# Altium footprint library DIM.PcbLib: 183 footprints (part 3 of 12)
Each footprint in its own frame and in the unit in brackets; x right, y up, seen from the top. Pads: shape width x height; smd on the part's side, far side on the other; paste and mask are expansions set on the pad; w line width, h text height; cw(c..) or ccw(c..) is an arc to the next point about the centre after c.
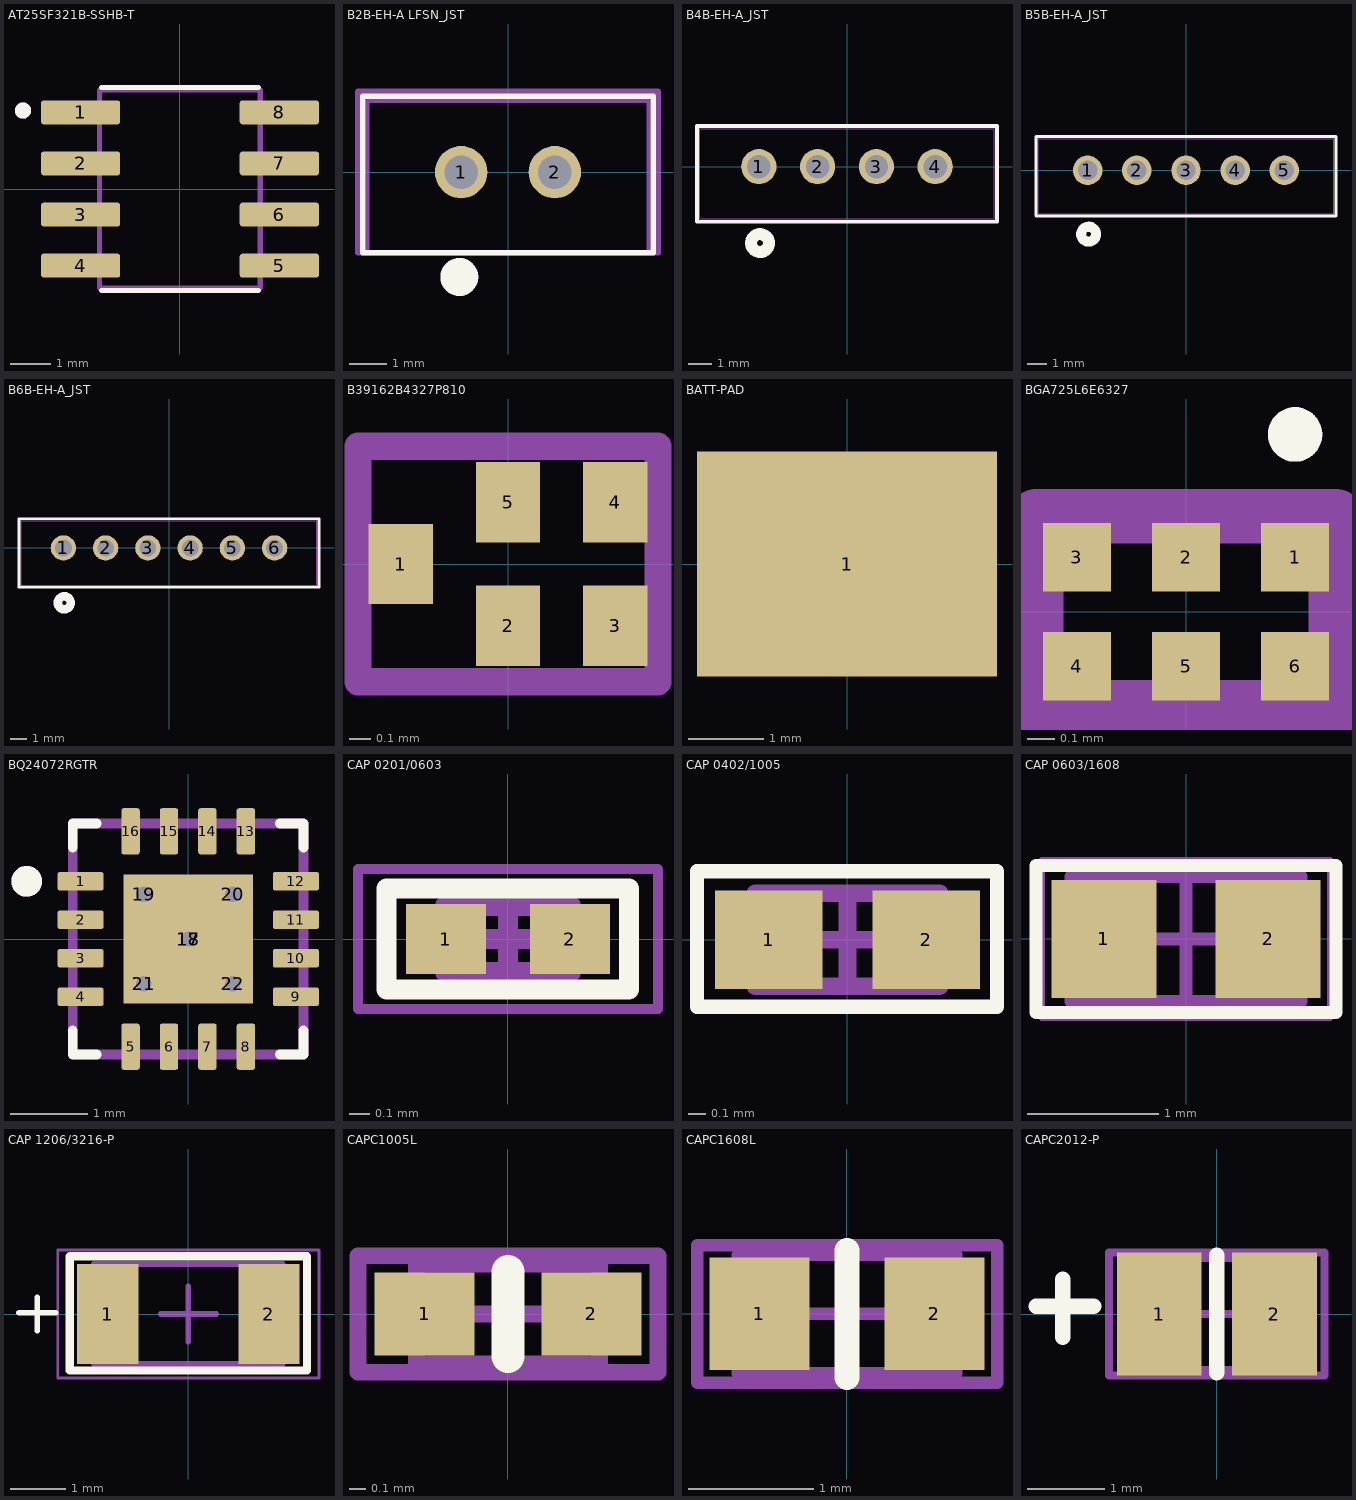
[diagram p2: the footprints below, top view; thin cyan lines are the x and y axes]

## AT25SF321B-SSHB-T [mm]
height 1.75
pads (8):
  rrect25% 1.97x0.6 smd: 1(-2.47,1.905) 2(-2.47,0.635) 3(-2.47,-0.635) 4(-2.47,-1.905) 5(2.47,-1.905) 6(2.47,-0.635) 7(2.47,0.635) 8(2.47,1.905)
Top Overlay:
  circle w0.2: c-3.9,1.95 r0.1
  lines w0.127: -1.95,-2.525 1.95,-2.525 ; -1.95,2.525 1.95,2.525
Mechanical 13:
  circle w0.2: c-3.9,1.95 r0.1
  lines w0.127: -1.995,-2.462 -1.995,2.462 1.995,2.462 1.995,-2.462 -1.995,-2.462
3D body "step_temp.STEP": height 1.75, standoff 0, extent -2.997,-2.462 2.997,2.462

## B2B-EH-A LFSN_JST [mm]
pads (2):
  round 1.397 hole 0.9 paste-2539.97 mask+0.102: 1(-1.25,0) 2(1.25,0)
Top Overlay:
  circle w0.508: c-1.3,-2.8 r0.254
  lines w0.152: -3.877,-2.15 3.877,-2.15 3.877,2.027 -3.877,2.027 -3.877,-2.15
Mechanical 13:
  lines w0.1: -3.75,-2.15 3.75,-2.15 3.75,1.9 -3.75,1.9 -3.75,-2.15
Mechanical 15:
  lines w0.152: -4.004,-2.154 -4.004,2.154 4.004,2.154 4.004,-2.154 -4.004,-2.154
3D body "B2B-EH-A.STEP": height 6, standoff -3.2, extent -3.75,-2.2 3.75,1.6

## B4B-EH-A_JST [mil]
pads (4):
  round 59 hole 39 paste-99999 mask+0: 1(-147.64,0) 2(-49.21,0) 3(49.21,0) 4(147.64,0)
Top Overlay:
  circle w20: c-145.67,-127.95 r15
  lines w6: -251.07,-92 -251.07,68 251.06,68 251.06,-92 -251.07,-92
Mechanical 13:
  lines w1: -246.07,-87 -246.07,63 246.06,63 246.06,-87 -246.07,-87

## B5B-EH-A_JST [mil]
pads (5):
  round 59 hole 39 paste-99999 mask+0: 1(-196.85,0) 2(-98.43,0) 3(0,0) 4(98.43,0) 5(196.85,0)
Top Overlay:
  circle w20: c-194.88,-127.95 r15
  lines w6: -300.29,-92 300.28,-92 300.28,68 -300.29,68 -300.29,-92
Mechanical 13:
  lines w1: -295.29,-87 295.28,-87 295.28,63 -295.29,63 -295.29,-87

## B6B-EH-A_JST [mil]
pads (6):
  round 59 hole 39 paste-99999 mask+0: 1(-246.06,0) 2(-147.64,0) 3(-49.21,0) 4(49.21,0) 5(147.64,0) 6(246.06,0)
Top Overlay:
  circle w20: c-244.09,-127.95 r15
  lines w6: -349.5,-92 -349.5,68 349.5,68 349.5,-92 -349.5,-92
Mechanical 13:
  lines w1: -344.5,-87 -344.5,63 344.5,63 344.5,-87 -344.5,-87

## B39162B4327P810 [mm]
pads (5):
  rect 0.3x0.375 smd: 1(-0.5,0) 2(0,-0.288) 3(0.5,-0.288) 4(0.5,0.288) 5(0,0.288)
Mechanical 13:
  lines w0.127: -0.7,-0.55 0.7,-0.55 0.7,0.55 -0.7,0.55 -0.7,-0.55

## BATT-PAD [mm]
pads (1):
  rect 4x3 smd mask+0.051: 1(0,0)

## BGA725L6E6327 [mm]
pads (6):
  rect 0.25x0.25 smd: 1(0.4,0.2) 2(0,0.2) 3(-0.4,0.2) 4(-0.4,-0.2) 5(0,-0.2) 6(0.4,-0.2)
Top Overlay:
  lines w0.1: 0.35,0.65 cw(c0.4,0.65) 0.45,0.65 cw(c0.4,0.65) 0.35,0.65
Mechanical 13:
  lines w0.2: -0.55,-0.35 -0.55,0.35 0.55,0.35 0.55,-0.35 -0.55,-0.35
3D body "BGA_725L6_E6327.stp": height 0.5, standoff 0, extent -0.55,-0.35 0.55,0.35

## BQ24072RGTR [mm]
pads (22):
  rrect25% 0.6x0.24 smd: 1(-1.4,0.75) 2(-1.4,0.25) 3(-1.4,-0.25) 4(-1.4,-0.75) 9(1.4,-0.75) 10(1.4,-0.25) 11(1.4,0.25) 12(1.4,0.75)
  rrect25% 0.24x0.6 smd: 5(-0.75,-1.4) 6(-0.25,-1.4) 7(0.25,-1.4) 8(0.75,-1.4) 13(0.75,1.4) 14(0.25,1.4) 15(-0.25,1.4) 16(-0.75,1.4)
  rect 1.68x1.68 smd paste-0.31: 17(0,0)
  round 0.4 hole 0.2 mask+0: 18(0,0) 19(-0.58,0.58) 20(0.58,0.58) 21(-0.58,-0.58) 22(0.58,-0.58)
Top Overlay:
  circle w0.2: c-2.1,0.75 r0.1
  lines w0.127: -1.5,-1.19 -1.5,-1.5 -1.19,-1.5 ; -1.5,1.19 -1.5,1.5 -1.19,1.5 ; 1.19,-1.5 1.5,-1.5 1.5,-1.19 ; 1.19,1.5 1.5,1.5 1.5,1.19
Mechanical 13:
  circle w0.2: c-2.1,0.75 r0.1
  lines w0.127: -1.5,-1.5 -1.5,1.5 1.5,1.5 1.5,-1.5 -1.5,-1.5
3D body "step_temp.STEP": height 1, standoff 0, extent -1.5,-1.5 1.5,1.5

## CAP 0201/0603 [mm] "Chip Capacitor, 2-Leads, Body 0.60x0.30mm, IPC Medium Density"
height 0.33
pads (2):
  rect 0.4x0.35 smd: 1(-0.31,0) 2(0.31,0)
Top Overlay:
  lines w0.1: -0.608,-0.252 -0.608,0.253 0.606,0.253 0.606,-0.252 -0.608,-0.252
Mechanical 13:
  lines w0.1: -0.315,-0.165 0.315,-0.165 0.315,0.165 -0.315,0.165 -0.315,-0.165
Mechanical 15:
  lines w0.05: -0.75,-0.35 0.75,-0.35 0.75,0.35 -0.75,0.35 -0.75,-0.35
  lines w0.1: -0.165,0 0.165,0 ; 0,-0.165 0,0.165
3D body "CAP 0201.STEP": height 0.3, standoff 0, extent -0.3,-0.15 0.3,0.15

## CAP 0402/1005 [mm] "Chip Capacitor, 2-Leads, Body 1.02x0.51mm, IPC Medium Density"
height 0.52
pads (2):
  rect 0.6x0.55 smd: 1(-0.44,0) 2(0.44,0)
Top Overlay:
  lines w0.08: -0.841,-0.374 0.836,-0.374 0.836,0.382 -0.841,0.382 -0.841,-0.141 -0.841,-0.374
Mechanical 13:
  lines w0.1: -0.515,-0.26 -0.515,0.26 0.515,0.26 0.515,-0.26 -0.515,-0.26
Mechanical 15:
  lines w0.1: -0.26,0 0.26,0 ; 0,-0.26 0,0.26
3D body "0402 cap.STEP": height 0.52, standoff 0, extent -0.5,-0.262 0.5,0.262

## CAP 0603/1608 [mm] "Chip Capacitor, 2-Leads, Body 1.60x0.80mm, IPC High Density"
height 0.89
pads (2):
  rect 0.8x0.9 smd: 1(-0.625,0) 2(0.625,0)
Top Overlay:
  lines w0.1: -1.143,-0.559 -1.143,0.559 1.143,0.559 1.143,-0.559 -1.143,-0.559
Mechanical 13:
  lines w0.1: -0.875,-0.475 -0.875,0.475 0.875,0.475 0.875,-0.475 -0.875,-0.475
Mechanical 15:
  lines w0.05: -1.1,-0.6 -1.1,0.6 1.1,0.6 1.1,-0.6 -1.1,-0.6
  lines w0.1: -0.475,0 0.475,0 ; 0,-0.475 0,0.475
3D body "0603 cap.STEP": height 0.82, standoff 0, extent -0.8,-0.412 0.8,0.412

## CAP 1206/3216-P [mm] "Chip Capacitor, 2-Leads, Body 3.25x1.60mm, IPC Medium Density"
height 0.8
pads (2):
  rect 1.1x1.8 smd: 1(-1.45,0) 2(1.45,0)
Top Overlay:
  lines w0.1: -3.048,0.025 -2.388,0.025 ; -2.718,-0.305 -2.718,0.305
  lines w0.15: -2.134,-1.016 2.134,-1.016 2.134,1.041 -2.134,1.041 -2.134,-1.016
Mechanical 13:
  lines w0.1: -1.7,-0.9 -1.7,0.9 1.7,0.9 1.7,-0.9 -1.7,-0.9
Mechanical 15:
  lines w0.05: -2.35,-1.15 -2.35,1.15 2.35,1.15 2.35,-1.15 -2.35,-1.15
  lines w0.1: -0.5,0 0.5,0 ; 0,-0.5 0,0.5
3D body "CAP 1206-0.8mm.STEP": height 0.8, standoff 0, extent -1.6,-0.8 1.6,0.8

## CAPC1005L [mm] "Chip Capacitor, Body 1.0x0.5mm, IPC High Density"
height 0.6
pads (2):
  rect 0.6x0.5 smd: 1(-0.5,0) 2(0.5,0)
Top Overlay:
  lines w0.2: 0,-0.254 0,0.254
Mechanical 13:
  lines w0.1: -0.55,-0.3 0.55,-0.3 0.55,0.3 -0.55,0.3 -0.55,-0.3
Mechanical 15:
  lines w0.1: -0.3,0 0.3,0 ; 0,-0.3 0,0.3 ; -0.9,-0.35 0.9,-0.35 0.9,0.35 -0.9,0.35 -0.9,-0.35
3D body: height 0.6, standoff 0, extent -0.55,-0.3 0.55,0.3
3D body: height 0.61, standoff 0, extent -0.55,-0.305 -0.3,0.305
3D body: height 0.61, standoff 0, extent 0.3,-0.305 0.559,0.305

## CAPC1608L [mm] "Chip Capacitor, Body 1.6x0.8mm, IPC High Density"
height 0.85
pads (2):
  rect 0.8x0.9 smd: 1(-0.7,0) 2(0.7,0)
Top Overlay:
  lines w0.2: 0,-0.508 0,0.508
Mechanical 13:
  lines w0.1: -0.875,-0.475 0.875,-0.475 0.875,0.475 -0.875,0.475 -0.875,-0.475
Mechanical 15:
  lines w0.1: -0.475,0 0.475,0 ; 0,-0.475 0,0.475 ; -1.2,-0.55 1.2,-0.55 1.2,0.55 -1.2,0.55 -1.2,-0.55
3D body: height 0.86, standoff 0, extent 0.508,-0.483 0.889,0.483
3D body: height 0.85, standoff 0, extent -0.875,-0.475 0.875,0.475
3D body: height 0.86, standoff 0, extent -0.889,-0.483 -0.508,0.483

## CAPC2012-P [mm] "Chip Capacitor, Body 2.0x1.3mm, IPC High Density"
height 1.1
pads (2):
  rect 1.1x1.6 smd: 1(-0.75,0) 2(0.75,0)
Top Overlay:
  lines w0.2: -2.35,0.1 -1.6,0.1 ; -2,-0.3 -2,0.45 ; 0,-0.762 0,0.762
Mechanical 13:
  lines w0.1: -1.1,-0.725 1.1,-0.725 1.1,0.725 -1.1,0.725 -1.1,-0.725
Mechanical 15:
  lines w0.1: -0.5,0 0.5,0 ; 0,-0.5 0,0.5 ; -1.4,-0.8 1.4,-0.8 1.4,0.8 -1.4,0.8 -1.4,-0.8
3D body "User Library-Chip Capacitor2.STEP": height 1.2, standoff 0, extent -0.984,-0.6 1.016,0.6